# Altium footprint library Verdin Development Board.PcbLib: 154 footprints (part 4 of 10)
Each footprint in its own frame and in the unit in brackets; x right, y up, seen from the top. Pads: shape width x height; smd on the part's side, far side on the other; paste and mask are expansions set on the pad; w line width, h text height; cw(c..) or ccw(c..) is an arc to the next point about the centre after c.
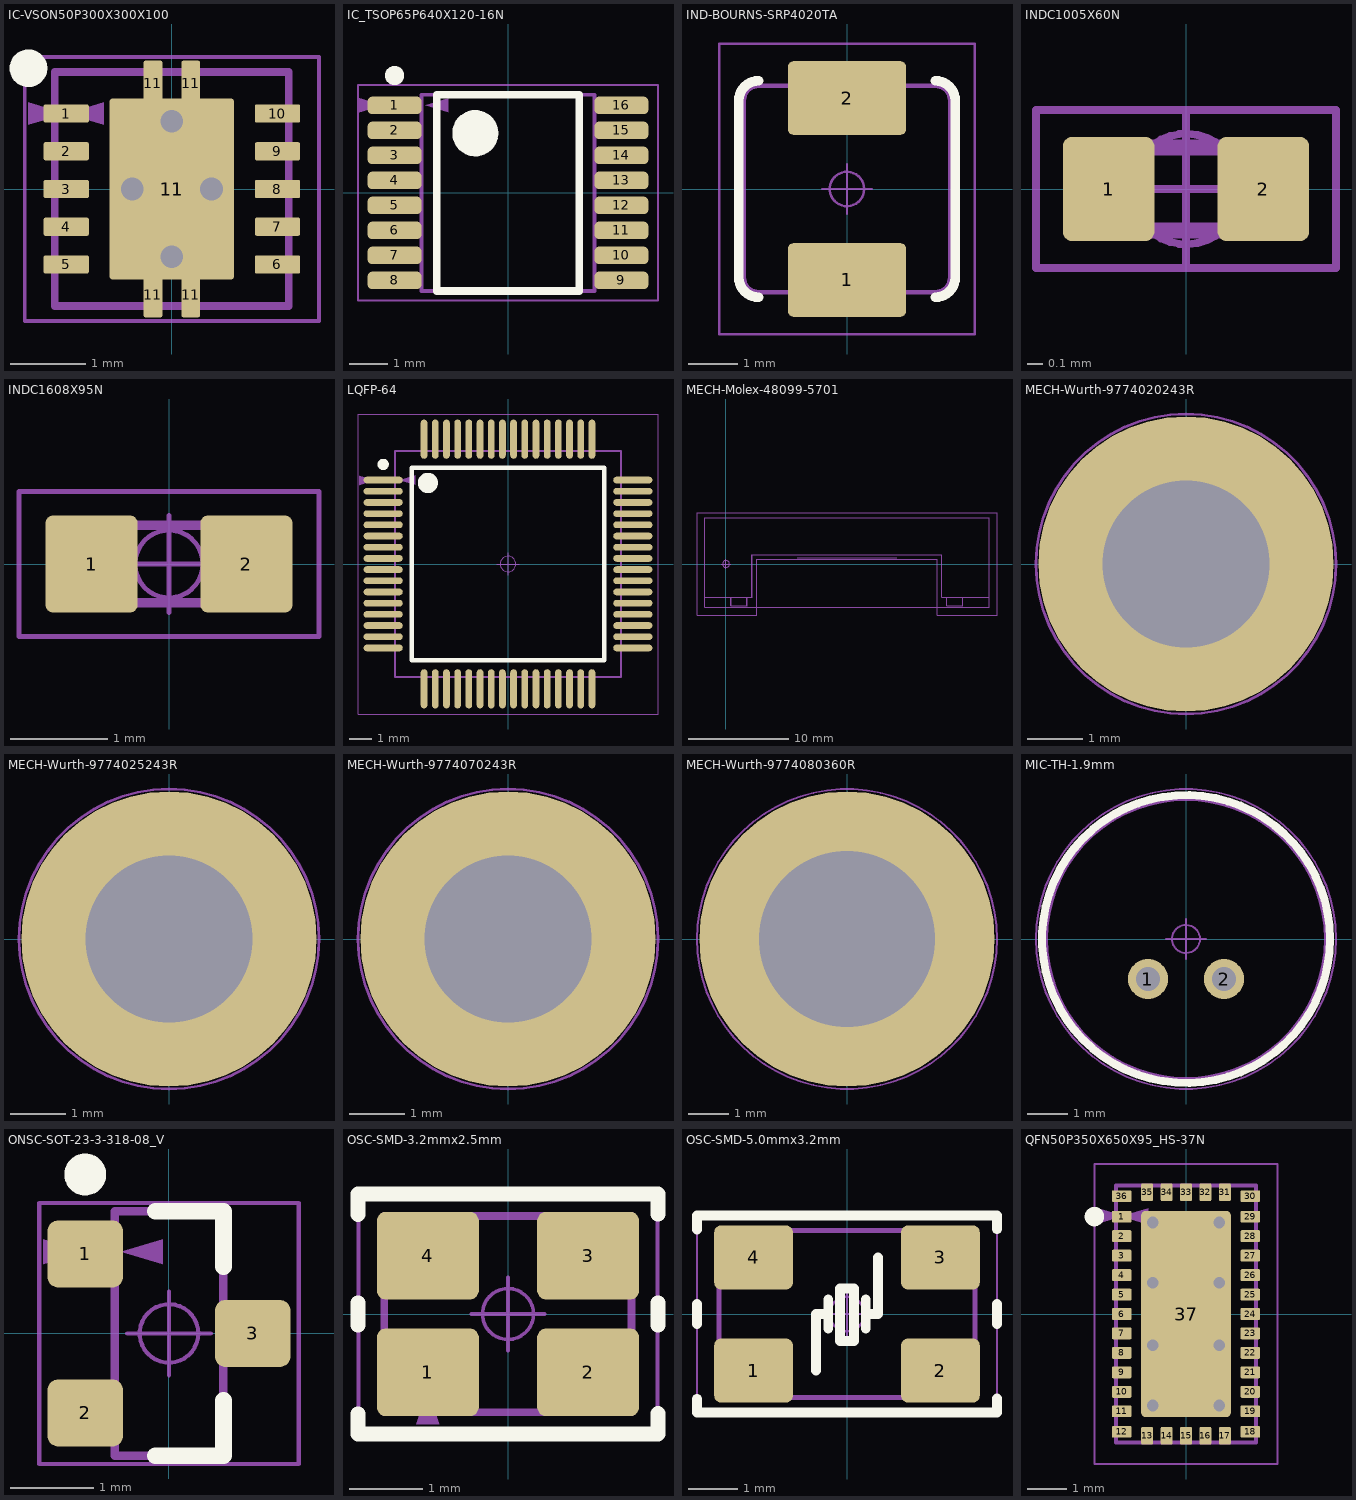
[diagram p3: the footprints below, top view; thin cyan lines are the x and y axes]

## IC-VSON50P300X300X100 [mm]
pads (15):
  rrect20% 0.6x0.24 smd: 1(-1.4,1) 2(-1.4,0.5) 3(-1.4,0) 4(-1.4,-0.5) 5(-1.4,-1) 6(1.4,-1) 7(1.4,-0.5) 8(1.4,0) 9(1.4,0.5) 10(1.4,1)
  rrect20% 0.25x0.6 smd paste-0.6: 11(-0.25,-1.4) 11(-0.25,1.4) 11(0.25,-1.4) 11(0.25,1.4)
  rrect5% 1.65x2.4 smd paste-2.4: 11(0,0)
via 0.525,0 diameter 0.6 hole 0.3
via -0.525,0 diameter 0.6 hole 0.3
via 0,0.9 diameter 0.6 hole 0.3
via 0,-0.9 diameter 0.6 hole 0.3
Top Overlay:
  circle w0.25: c-1.9,1.6 r0.125
Top Paste:
  drawing of 9 lines, arcs and shapes, not listed
Top Component Outline:
  region: -1.9,0.85 -1.4,1 -1.9,1.15
  lines w0.05: -1.95,-1.75 1.95,-1.75 1.95,1.75 -1.95,1.75 -1.95,-1.75
Top Dimensions:
  region: -0.9,1.15 -1.4,1 -0.9,0.85
  lines w0.1: -1.55,-1.55 -1.55,1.55 1.55,1.55 1.55,-1.55 -1.55,-1.55
Top Component Center:
  circle w0.05: c0,0 r0.35
  lines w0.05: -0.5,0 0.5,0 ; 0,-0.5 0,0.5
Top Assembly:
  text ".Designator" at -1.75,2 h0.75
3D body "test-10.step": height 1, standoff 0, extent -1.551,-1.551 1.551,1.551

## IC_TSOP65P640X120-16N [mm]
pads (16):
  rrect50% 1.4x0.45 smd: 1(-2.95,2.275) 2(-2.95,1.625) 3(-2.95,0.975) 4(-2.95,0.325) 5(-2.95,-0.325) 6(-2.95,-0.975) 7(-2.95,-1.625) 8(-2.95,-2.275) 9(2.95,-2.275) 10(2.95,-1.625) 11(2.95,-0.975) 12(2.95,-0.325) 13(2.95,0.325) 14(2.95,0.975) 15(2.95,1.625) 16(2.95,2.275)
Top Overlay:
  circle w0.6: c-0.85,1.55 r0.3
  circle w0.25: c-2.95,3.05 r0.125
  lines w0.2: -1.85,-2.55 -1.85,2.55 1.85,2.55 1.85,-2.55 -1.85,-2.55
Top Component Outline:
  region: -3.9,2.08 -3.25,2.275 -3.9,2.47
  lines w0.05: -3.9,-2.8 -3.9,2.8 3.9,2.8 3.9,-2.8 -3.9,-2.8
Top 3D Body:
  lines w0.001: -2.25,-2.55 2.25,-2.55 2.25,2.55 -2.25,2.55 -2.25,-2.55
Top Dimensions:
  region: -1.55,2.455 -2.15,2.275 -1.55,2.095
  lines w0.1: -2.25,-2.55 -2.25,2.55 2.25,2.55 2.25,-2.55 -2.25,-2.55
Top Assembly:
  text ".Designator" at -0.7,-1.2 h0.75
3D body "test-1.step": height 1.2, standoff 0, extent -3.2,-2.55 3.2,2.55

## IND-BOURNS-SRP4020TA [mm]
pads (2):
  rrect15% 2.4x1.5 smd: 1(0,-1.85) 2(0,1.85)
Top Overlay:
  lines w0.2: -1.8,-2.2 cw(c-1.8,-1.8) -2.2,-1.8 -2.2,1.8 cw(c-1.8,1.8) -1.8,2.2 ; 1.8,-2.2 ccw(c1.8,-1.8) 2.2,-1.8 2.2,1.8 ccw(c1.8,1.8) 1.8,2.2
Top Component Outline:
  lines w0.05: -2.6,-2.95 -2.6,2.95 2.6,2.95 2.6,-2.95 -2.6,-2.95
Top 3D Body:
  lines w0.001: -2.1,-1.8 ccw(c-1.8,-1.8) -1.8,-2.1 1.8,-2.1 ccw(c1.8,-1.8) 2.1,-1.8 2.1,1.8 ccw(c1.8,1.8) 1.8,2.1 -1.8,2.1 ccw(c-1.8,1.8) -2.1,1.8 -2.1,-1.8
Top Dimensions:
  lines w0.1: -2.1,-1.8 ccw(c-1.8,-1.8) -1.8,-2.1 1.8,-2.1 ccw(c1.8,-1.8) 2.1,-1.8 2.1,1.8 ccw(c1.8,1.8) 1.8,2.1 -1.8,2.1 ccw(c-1.8,1.8) -2.1,1.8 -2.1,-1.8
Top Component Center:
  circle w0.05: c0,0 r0.35
  lines w0.05: -0.5,0 0.5,0 ; 0,-0.5 0,0.5
Top Assembly:
  text ".Designator" at -2.025,3.3 h0.75
3D body "SRP4020TA series.stp": height 1.92, standoff 0.01, extent -2.1,-2.2 2.1,2.2

## INDC1005X60N [mm]
pads (2):
  rrect20% 0.58x0.66 smd: 1(-0.49,0) 2(0.49,0)
Top Component Outline:
  lines w0.05: -0.95,-0.5 -0.95,0.5 0.95,0.5 0.95,-0.5 -0.95,-0.5
Top 3D Body:
  lines w0.001: -0.5,-0.25 -0.5,0.25 0.5,0.25 0.5,-0.25 -0.5,-0.25
Top Dimensions:
  lines w0.1: -0.512,-0.262 -0.512,0.262 0.512,0.262 0.512,-0.262 -0.512,-0.262
Top Component Center:
  circle w0.05: c0,0 r0.35
  lines w0.05: -0.5,0 0.5,0 ; 0,-0.5 0,0.5
Top Assembly:
  text ".Designator" at -0.925,0.775 h0.75
3D body "User Library-FB_1005.STEP": height 0.5, standoff 0, extent -0.5,-0.25 0.5,0.25

## INDC1608X95N [mm]
pads (2):
  rrect15% 0.95x1 smd: 1(-0.8,0) 2(0.8,0)
Top Component Outline:
  lines w0.05: -1.55,-0.75 -1.55,0.75 1.55,0.75 1.55,-0.75 -1.55,-0.75
Top 3D Body:
  lines w0.001: -0.8,-0.4 -0.8,0.4 0.8,0.4 0.8,-0.4 -0.8,-0.4
Top Dimensions:
  lines w0.1: -0.8,-0.4 -0.8,0.4 0.8,0.4 0.8,-0.4 -0.8,-0.4
Top Component Center:
  circle w0.05: c0,0 r0.35
  lines w0.05: -0.5,0 0.5,0 ; 0,-0.5 0,0.5
Top Assembly:
  text ".Designator" at -1.25,1.025 h0.75
3D body "User Library-FB_1608-1.STEP": height 0.8, standoff 0, extent -0.8,-0.4 0.8,0.4

## LQFP-64 [mm]
pads (64):
  oval 1.75x0.3 smd: 1(-5.575,3.75) 2(-5.575,3.25) 3(-5.575,2.75) 4(-5.575,2.25) 5(-5.575,1.75) 6(-5.575,1.25) 7(-5.575,0.75) 8(-5.575,0.25) 9(-5.575,-0.25) 10(-5.575,-0.75) 11(-5.575,-1.25) 12(-5.575,-1.75) 13(-5.575,-2.25) 14(-5.575,-2.75) 15(-5.575,-3.25) 16(-5.575,-3.75) 33(5.575,-3.75) 34(5.575,-3.25) 35(5.575,-2.75) 36(5.575,-2.25) 37(5.575,-1.75) 38(5.575,-1.25) 39(5.575,-0.75) 40(5.575,-0.25) 41(5.575,0.25) 42(5.575,0.75) 43(5.575,1.25) 44(5.575,1.75) 45(5.575,2.25) 46(5.575,2.75) 47(5.575,3.25) 48(5.575,3.75)
  oval 0.3x1.75 smd: 17(-3.75,-5.575) 18(-3.25,-5.575) 19(-2.75,-5.575) 20(-2.25,-5.575) 21(-1.75,-5.575) 22(-1.25,-5.575) 23(-0.75,-5.575) 24(-0.25,-5.575) 25(0.25,-5.575) 26(0.75,-5.575) 27(1.25,-5.575) 28(1.75,-5.575) 29(2.25,-5.575) 30(2.75,-5.575) 31(3.25,-5.575) 32(3.75,-5.575) 49(3.75,5.575) 50(3.25,5.575) 51(2.75,5.575) 52(2.25,5.575) 53(1.75,5.575) 54(1.25,5.575) 55(0.75,5.575) 56(0.25,5.575) 57(-0.25,5.575) 58(-0.75,5.575) 59(-1.25,5.575) 60(-1.75,5.575) 61(-2.25,5.575) 62(-2.75,5.575) 63(-3.25,5.575) 64(-3.75,5.575)
Top Overlay:
  circle w0.6: c-3.58,3.62 r0.15
  circle w0.25: c-5.575,4.45 r0.125
  lines w0.2: -4.3,-4.3 4.3,-4.3 4.3,4.3 -4.3,4.3 -4.3,-4.3
Top Component Outline:
  region: -6.655,3.519 -5.945,3.731 -6.655,3.945
  lines w0.05: -6.7,-6.7 -6.7,6.7 6.7,6.7 6.7,-6.7 -6.7,-6.7
Top 3D Body:
  lines w0.01: -5.05,-5.05 -5.05,5.05 5.05,5.05 5.05,-5.05 -5.05,-5.05
Top Dimensions:
  region: -4.145,3.956 -4.855,3.744 -4.145,3.531
  lines w0.1: -5.05,-5.05 5.05,-5.05 5.05,5.05 -5.05,5.05 -5.05,-5.05
Top Component Center:
  circle w0.05: c0,0 r0.35
  lines w0.05: -0.5,0 0.5,0 ; 0,-0.5 0,0.5
Top Assembly:
  text ".Designator" at -1.8,7.075 h0.75
3D body "test-12.step": height 1.6, standoff 0, extent -6,-6 6,6

## MECH-Molex-48099-5701 [mm]
Top Component Outline:
  lines w0.05: -2.9,-5.15 -2.9,5.15 27.1,5.15 27.1,-5.15 21.15,-5.15 21.15,0.5 3.05,0.5 3.05,-5.15 -2.9,-5.15
Top 3D Body:
  lines w0.001: 0.5,-3.35 0.5,-4.16 2.1,-4.16 2.1,-3.35 ; 7.1,0.6 17.1,0.6 ; 22.1,-3.35 22.1,-4.16 23.7,-4.16 23.7,-3.35 ; -2.125,-3.35 2.6,-3.35 2.6,0.93 21.6,0.93 21.6,-3.35 26.325,-3.35 ; -2.125,-3.35 -2.125,4.6 26.325,4.6 26.325,-3.35 ; -2.125,-3.35 -2.125,-4.31 26.325,-4.31 26.325,-3.35
Top Dimensions:
  lines w0.1: 0.5,-3.35 0.5,-4.16 2.1,-4.16 2.1,-3.35 ; 22.1,-3.35 22.1,-4.16 23.7,-4.16 23.7,-3.35 ; -2.125,-3.35 2.6,-3.35 2.6,0.93 21.6,0.93 21.6,-3.35 26.325,-3.35 26.325,4.6 -2.125,4.6 -2.125,-3.35
Top Component Center:
  circle w0.05: c0,0 r0.35
  lines w0.05: -0.5,0 0.5,0 ; 0,-0.5 0,0.5
Top Assembly:
  text ".Designator" at 10.236,-5.029 h0.75
3D body "Mech (1).STEP": height 6.56, standoff -0.73, extent -2.125,-4.31 26.325,4.6

## MECH-Wurth-9774020243R [mm]
height 2
pads (1):
  round 5.3 / inner round 0 / far side round 0 hole 3 unplated: ""(0,0)
Top Paste:
  region: -0.3,-1.521 -0.411,-1.494 -0.627,-1.418 -0.828,-1.31 -1.012,-1.174 -1.174,-1.012 -1.31,-0.828 -1.418,-0.627 -1.494,-0.411 -1.521,-0.3 -2.542,-0.3 -2.517,-0.513 -2.397,-0.924 -2.21,-1.31 -1.962,-1.659 -1.659,-1.962 -1.31,-2.21 -0.924,-2.397 -0.513,-2.517 -0.3,-2.542
  region: 0.3,-2.542 0.3,-1.521 0.411,-1.494 0.627,-1.418 0.828,-1.31 1.012,-1.174 1.174,-1.012 1.31,-0.828 1.418,-0.627 1.494,-0.411 1.521,-0.3 2.542,-0.3 2.517,-0.513 2.397,-0.924 2.21,-1.31 1.962,-1.659 1.659,-1.962 1.31,-2.21 0.924,-2.397 0.513,-2.517
  region: 1.521,0.3 1.494,0.411 1.418,0.627 1.31,0.828 1.174,1.012 1.012,1.174 0.828,1.31 0.627,1.418 0.411,1.494 0.3,1.521 0.3,2.542 0.513,2.517 0.924,2.397 1.31,2.21 1.659,1.962 1.962,1.659 2.21,1.31 2.397,0.924 2.517,0.513 2.542,0.3
  region: -2.542,0.3 -2.517,0.513 -2.397,0.924 -2.21,1.31 -1.962,1.659 -1.659,1.962 -1.31,2.21 -0.924,2.397 -0.513,2.517 -0.3,2.542 -0.3,1.521 -0.411,1.494 -0.627,1.418 -0.828,1.31 -1.012,1.174 -1.174,1.012 -1.31,0.828 -1.418,0.627 -1.494,0.411 -1.521,0.3
Top Component Outline:
  circle w0.05: c0,0 r2.693
  circle w0.05: c0,0 r1.499
Top 3D Body:
  circle w0.001: c0,0 r2.175
Top Dimensions:
  circle w0.1: c0,0 r2.175
Top Component Center:
  circle w0.05: c0,0 r0.35
  lines w0.05: -0.5,0 0.5,0 ; 0,-0.5 0,0.5
Top Assembly:
  text ".Designator" at -1.321,-0.152 h0.75
3D body "9774020243R_Download_STP_9774020243R_rev1.stp": height 2.01, standoff -1.39, extent -2.175,-2.172 2.175,2.172

## MECH-Wurth-9774025243R [mm]
pads (1):
  round 5.3 / inner round 0 / far side round 0 hole 3 unplated: ""(0,0)
Top Paste:
  region: -2.542,0.3 -2.517,0.513 -2.397,0.924 -2.21,1.31 -1.962,1.659 -1.659,1.962 -1.31,2.21 -0.924,2.397 -0.513,2.517 -0.3,2.542 -0.3,1.521 -0.411,1.494 -0.627,1.418 -0.828,1.31 -1.012,1.174 -1.174,1.012 -1.31,0.828 -1.418,0.627 -1.494,0.411 -1.521,0.3
  region: 1.521,0.3 1.494,0.411 1.418,0.627 1.31,0.828 1.174,1.012 1.012,1.174 0.828,1.31 0.627,1.418 0.411,1.494 0.3,1.521 0.3,2.542 0.513,2.517 0.924,2.397 1.31,2.21 1.659,1.962 1.962,1.659 2.21,1.31 2.397,0.924 2.517,0.513 2.542,0.3
  region: 0.3,-2.542 0.3,-1.521 0.411,-1.494 0.627,-1.418 0.828,-1.31 1.012,-1.174 1.174,-1.012 1.31,-0.828 1.418,-0.627 1.494,-0.411 1.521,-0.3 2.542,-0.3 2.517,-0.513 2.397,-0.924 2.21,-1.31 1.962,-1.659 1.659,-1.962 1.31,-2.21 0.924,-2.397 0.513,-2.517
  region: -0.3,-1.521 -0.411,-1.494 -0.627,-1.418 -0.828,-1.31 -1.012,-1.174 -1.174,-1.012 -1.31,-0.828 -1.418,-0.627 -1.494,-0.411 -1.521,-0.3 -2.542,-0.3 -2.517,-0.513 -2.397,-0.924 -2.21,-1.31 -1.962,-1.659 -1.659,-1.962 -1.31,-2.21 -0.924,-2.397 -0.513,-2.517 -0.3,-2.542
Top Component Outline:
  circle w0.05: c0,0 r1.499
  circle w0.05: c0,0 r2.693
Top 3D Body:
  circle w0.001: c0,0 r2.175
Top Dimensions:
  circle w0.1: c0,0 r2.175
Top Component Center:
  circle w0.05: c0,0 r0.35
  lines w0.05: -0.5,0 0.5,0 ; 0,-0.5 0,0.5
Top Assembly:
  text ".Designator" at -1.321,-0.152 h0.75
3D body "9774025243R (rev1).stp": height 2.51, standoff -1.39, extent -2.175,-2.172 2.175,2.172

## MECH-Wurth-9774070243R [mm]
pads (1):
  round 5.3 / inner round 0 / far side round 0 hole 3 unplated: ""(0,0)
Top Paste:
  region: -0.3,-1.521 -0.411,-1.494 -0.627,-1.418 -0.828,-1.31 -1.012,-1.174 -1.174,-1.012 -1.31,-0.828 -1.418,-0.627 -1.494,-0.411 -1.521,-0.3 -2.542,-0.3 -2.517,-0.513 -2.397,-0.924 -2.21,-1.31 -1.962,-1.659 -1.659,-1.962 -1.31,-2.21 -0.924,-2.397 -0.513,-2.517 -0.3,-2.542
  region: 0.3,-2.542 0.3,-1.521 0.411,-1.494 0.627,-1.418 0.828,-1.31 1.012,-1.174 1.174,-1.012 1.31,-0.828 1.418,-0.627 1.494,-0.411 1.521,-0.3 2.542,-0.3 2.517,-0.513 2.397,-0.924 2.21,-1.31 1.962,-1.659 1.659,-1.962 1.31,-2.21 0.924,-2.397 0.513,-2.517
  region: 1.521,0.3 1.494,0.411 1.418,0.627 1.31,0.828 1.174,1.012 1.012,1.174 0.828,1.31 0.627,1.418 0.411,1.494 0.3,1.521 0.3,2.542 0.513,2.517 0.924,2.397 1.31,2.21 1.659,1.962 1.962,1.659 2.21,1.31 2.397,0.924 2.517,0.513 2.542,0.3
  region: -2.542,0.3 -2.517,0.513 -2.397,0.924 -2.21,1.31 -1.962,1.659 -1.659,1.962 -1.31,2.21 -0.924,2.397 -0.513,2.517 -0.3,2.542 -0.3,1.521 -0.411,1.494 -0.627,1.418 -0.828,1.31 -1.012,1.174 -1.174,1.012 -1.31,0.828 -1.418,0.627 -1.494,0.411 -1.521,0.3
Top Component Outline:
  circle w0.05: c0,0 r2.693
  circle w0.05: c0,0 r1.499
Top 3D Body:
  circle w0.001: c0,0 r2.175
Top Dimensions:
  circle w0.1: c0,0 r2.175
Top Component Center:
  circle w0.05: c0,0 r0.35
  lines w0.05: -0.5,0 0.5,0 ; 0,-0.5 0,0.5
Top Assembly:
  text ".Designator" at -1.321,-0.152 h0.75
3D body "9774070243R (rev1).stp": height 7.01, standoff -1.39, extent -2.175,-2.172 2.175,2.172

## MECH-Wurth-9774080360R [mm]
pads (1):
  round 7.4 / inner round 0 / far side round 0 hole 4.4 unplated: ""(0,0)
Top Paste:
  region: 0.4,2.214 0.567,2.177 0.889,2.067 1.191,1.909 1.466,1.707 1.707,1.466 1.909,1.191 2.067,0.889 2.177,0.567 2.214,0.4 3.628,0.4 3.605,0.604 3.514,1.004 3.379,1.391 3.2,1.761 2.982,2.108 2.725,2.428 2.434,2.717 2.112,2.971 1.763,3.188 1.393,3.363 1.005,3.496 0.604,3.584 0.4,3.606
  region: 2.214,-0.4 2.177,-0.567 2.067,-0.889 1.909,-1.191 1.707,-1.466 1.466,-1.707 1.191,-1.909 0.889,-2.067 0.567,-2.177 0.4,-2.214 0.4,-3.628 0.604,-3.605 1.004,-3.514 1.391,-3.379 1.761,-3.2 2.108,-2.982 2.428,-2.725 2.717,-2.434 2.971,-2.112 3.188,-1.763 3.363,-1.393 3.496,-1.005 3.584,-0.604 3.606,-0.4
  region: -0.4,-2.214 -0.567,-2.177 -0.889,-2.067 -1.191,-1.909 -1.466,-1.707 -1.707,-1.466 -1.909,-1.191 -2.067,-0.889 -2.177,-0.567 -2.214,-0.4 -3.628,-0.4 -3.605,-0.604 -3.514,-1.004 -3.379,-1.391 -3.2,-1.761 -2.982,-2.108 -2.725,-2.428 -2.434,-2.717 -2.112,-2.971 -1.763,-3.188 -1.393,-3.363 -1.005,-3.496 -0.604,-3.584 -0.4,-3.606
  region: -2.214,0.4 -2.177,0.567 -2.067,0.889 -1.909,1.191 -1.707,1.466 -1.466,1.707 -1.191,1.909 -0.889,2.067 -0.567,2.177 -0.4,2.214 -0.4,3.628 -0.604,3.605 -1.004,3.514 -1.391,3.379 -1.761,3.2 -2.108,2.982 -2.428,2.725 -2.717,2.434 -2.971,2.112 -3.188,1.763 -3.363,1.393 -3.496,1.005 -3.584,0.604 -3.606,0.4
Top Component Outline:
  circle w0.05: c0,0 r3.759
  circle w0.05: c0,0 r2.219
Top 3D Body:
  circle w0.001: c0,0 r3
Top Dimensions:
  circle w0.1: c0,0 r3
Top Component Center:
  circle w0.05: c0,0 r0.35
  lines w0.05: -0.5,0 0.5,0 ; 0,-0.5 0,0.5
Top Assembly:
  text ".Designator" at -1.346,-0.152 h0.75
Bottom 3D Body:
  circle w0.1: c0,0 r2.24
  circle w0.1: c0,0 r3.635
3D body "9774080360R (rev1).stp": height 8, standoff -1.4, extent -3,-3 3,3

## MIC-TH-1.9mm [mm]
pads (2):
  round 1 hole 0.6: 1(-0.95,-1) 2(0.95,-1)
Top Overlay:
  circle w0.2: c0,0 r3.6
Top Component Outline:
  circle w0.05: c0,0 r3.75
Top 3D Body:
  circle w0.001: c0,0 r3.5
Top Dimensions:
  circle w0.1: c0,0 r3.5
Top Component Center:
  circle w0.05: c0,0 r0.35
  lines w0.05: -0.5,0 0.5,0 ; 0,-0.5 0,0.5
Top Assembly:
  text ".Designator" at -1.689,-0.145 h0.75
3D body "CUI_DEVICES_CMEJ-0706-42-P.step": height 6.01, standoff -2.79, extent -3.5,-3.5 3.5,3.5

## ONSC-SOT-23-3-318-08_V [mm]
pads (3):
  rrect30% 0.9x0.8 smd: 1(-1,0.95) 2(-1,-0.95) 3(1,0)
Top Overlay:
  circle w0.25: c-1,1.9 r0.125
  lines w0.2: -0.165,-1.46 0.65,-1.46 0.65,-0.8 ; -0.165,1.46 0.65,1.46 0.65,0.8
Top Component Outline:
  region: -1.5,0.825 -1,0.975 -1.5,1.125
  lines w0.05: -1.55,-1.56 -1.55,1.56 1.55,1.56 1.55,-1.56 -1.55,-1.56
Top 3D Body:
  lines w0.001: -0.65,-1.46 0.65,-1.46 0.65,1.46 -0.65,1.46 -0.65,-1.46
Top Dimensions:
  region: -0.075,1.125 -0.575,0.975 -0.075,0.825
  lines w0.1: -0.65,-1.46 0.65,-1.46 0.65,1.46 -0.65,1.46 -0.65,-1.46
Top Component Center:
  circle w0.05: c0,0 r0.35
  lines w0.05: -0.5,0 0.5,0 ; 0,-0.5 0,0.5
Top Assembly:
  text ".Designator" at -1.55,1.85 h0.75
3D body "User Library-SOT-23-2.STEP": height 1.08, standoff 0, extent -1.32,-1.5 1.32,1.5

## OSC-SMD-3.2mmx2.5mm [mm] "Oscillator SMD, 3.2mmx2.5mmx0.8mm"
height 0.8
pads (4):
  rrect20% 1.4x1.2 smd: 1(-1.1,-0.8) 2(1.1,-0.8) 3(1.1,0.8) 4(-1.1,0.8)
Top Overlay:
  lines w0.2: -2.057,-1.366 -2.057,-1.645 2.057,-1.645 2.057,-1.364 ; -2.057,-0.152 -2.057,0.152 ; -2.057,1.364 -2.057,1.645 2.057,1.645 2.057,1.366 ; 2.057,-0.152 2.057,0.152
Top Component Outline:
  region: -1.101,-1.028 -0.941,-1.509 -1.261,-1.509
  lines w0.05: -2.05,-1.65 -2.05,1.65 2.05,1.65 2.05,-1.65 -2.05,-1.65
Top 3D Body:
  lines w0.001: -1.65,-1.3 -1.65,1.3 ; -1.65,-1.3 -1.65,-1.3 ; -1.65,-1.3 1.65,-1.3 1.65,1.3 ; -1.65,1.3 1.65,1.3 ; -1.65,1.3 -1.65,-1.3 1.65,-1.3 1.65,1.3 ; -1.65,1.3 1.65,1.3 ; 1.65,1.3 1.65,1.3
Top Dimensions:
  region: -1.1,-0.819 -0.94,-1.3 -1.26,-1.3
  lines w0.1: -1.7,-1.35 1.7,-1.35 1.7,1.35 -1.7,1.35 -1.7,-1.35
Top Component Center:
  circle w0.05: c0,0 r0.35
  lines w0.05: -0.5,0 0.5,0 ; 0,-0.5 0,0.5
Top Assembly:
  text ".Designator" at -1.689,-0.17 h0.75
3D body "User Library-Crystal TXC Corp 7M series.step": height 0.8, standoff 0, extent -1.65,-1.3 1.65,1.3

## OSC-SMD-5.0mmx3.2mm [mm]
pads (4):
  rrect20% 1.6x1.3 smd: 1(-1.9,-1.15) 2(1.9,-1.15) 3(1.9,1.15) 4(-1.9,1.15)
Top Overlay:
  lines w0.2: -3.05,-1.722 -3.05,-2.001 3.05,-2.001 ; -3.05,-0.2 -3.05,0.2 ; -3.05,1.72 -3.05,1.999 ; -3.05,2.001 3.05,2.001 3.05,1.722 ; -0.63,-1.15 -0.63,0 -0.38,0 ; -0.38,-0.3 -0.38,0.3 ; 0.38,-0.3 0.38,0.3 ; 0.38,0 0.63,0 0.63,1.15 ; 3.05,-1.999 3.05,-1.72 ; 3.05,-0.2 3.05,0.2 ; -0.14,-0.55 -0.14,0.52 0.14,0.52 0.14,-0.55 -0.14,-0.55
Top Component Outline:
  lines w0.05: -3.05,-2.001 3.05,-2.001 3.05,2.001 -3.05,2.001 -3.05,-2.001
Top 3D Body:
  lines w0.001: -2.6,-1.7 2.6,-1.7 2.6,1.7 -2.6,1.7 -2.6,-1.7
Top Dimensions:
  lines w0.1: -2.6,-1.7 2.6,-1.7 2.6,1.7 -2.6,1.7 -2.6,-1.7
Top Component Center:
  circle w0.05: c0,0 r0.35
  lines w0.05: -0.5,0 0.5,0 ; 0,-0.5 0,0.5
Top Assembly:
  text ".Designator" at -1.905,2.388 h0.75
3D body "User Library-Crystal_0.stp": height 0.8, standoff -0.05, extent -2.5,-1.6 2.5,1.6

## QFN50P350X650X95_HS-37N [mm]
pads (37):
  rrect20% 0.5x0.3 smd paste-0.01: 1(-1.65,2.5) 2(-1.65,2) 3(-1.65,1.5) 4(-1.65,1) 5(-1.65,0.5) 6(-1.65,0) 7(-1.65,-0.5) 8(-1.65,-1) 9(-1.65,-1.5) 10(-1.65,-2) 11(-1.65,-2.5) 12(-1.65,-3.025) 18(1.65,-3.025) 19(1.65,-2.5) 20(1.65,-2) 21(1.65,-1.5) 22(1.65,-1) 23(1.65,-0.5) 24(1.65,0) 25(1.65,0.5) 26(1.65,1) 27(1.65,1.5) 28(1.65,2) 29(1.65,2.5) 30(1.65,3.025) 36(-1.65,3.025)
  rrect20% 0.3x0.45 smd paste-0.01: 13(-1,-3.125) 14(-0.5,-3.125) 15(0,-3.125) 16(0.5,-3.125) 17(1,-3.125) 31(1,3.125) 32(0.5,3.125) 33(0,3.125) 34(-0.5,3.125) 35(-1,3.125)
  rrect10% 2.3x5.3 smd paste-2: 37(0,0)
via -0.85,2.35 diameter 0.6 hole 0.3
via 0.85,2.35 diameter 0.6 hole 0.3
via -0.85,-2.35 diameter 0.6 hole 0.3
via 0.85,-2.35 diameter 0.6 hole 0.3
via 0.85,0.8 diameter 0.6 hole 0.3
via 0.85,-0.8 diameter 0.6 hole 0.3
via -0.85,0.8 diameter 0.6 hole 0.3
via -0.85,-0.8 diameter 0.6 hole 0.3
Top Overlay:
  circle w0.25: c-2.35,2.5 r0.125
Top Paste:
  rectangle: -0.6,-2.35 0.6,2.35
Top Component Outline:
  region: -2.305,2.306 -1.595,2.518 -2.305,2.732
  lines w0.05: -2.35,-3.85 2.35,-3.85 2.35,3.85 -2.35,3.85 -2.35,-3.85
Top 3D Body:
  lines w0.001: -1.801,-3.301 1.801,-3.301 1.801,3.301 -1.801,3.301 -1.801,-3.301
Top Dimensions:
  region: -0.97,2.719 -1.68,2.507 -0.97,2.293
  lines w0.1: -1.8,-3.3 -1.8,3.3 1.8,3.3 1.8,-3.3 -1.8,-3.3
Top Component Center:
  circle w0.05: c0,0 r0.35
  lines w0.05: -0.5,0 0.5,0 ; 0,-0.5 0,0.5
Top Assembly:
  text ".Designator" at 0.17,-1.689 h0.75
3D body "QFN50P350X650X95_HS-37N.step": height 0.95, standoff 0, extent -1.801,-3.301 1.801,3.301